# Altium schematic symbol library 可调稳压模块.SchLib: 5 symbols
Pins are listed as number, name and electrical type; pins without a type are passive.

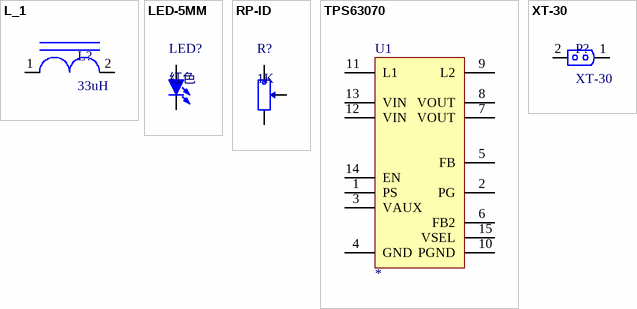
[diagram p0: symbols L_1 to XT-30]

## L_1
designator L?, comment 33uH
一体化成型电感
footprint IND-SMD_L7.0-W6.6_FXL0630
pins: 1, 2

## LED-5MM
designator LED?, comment 红色
0805LED; BOM名称: 5mm插件LED; 版权归属: 源创客; 学习资源: www.ooocke.com
footprint LED 0805B (蓝色0805LED)
pins: 1 A, 2 K

## RP-ID
designator R?, comment 1K
插件单联电位器; BOM名称: 插件电位器; 版权归属: 源创客; 学习资源: www.ooocke.com
footprint 3296W (Precise Multi-Winding Adjustable Resistor)
pins: 1, 2, 3

## TPS63070
designator U1
TPS63070
footprint LQ_VQFN15
pins: 1 PS, 2 PG, 3 VAUX, 4 GND, 5 FB, 6 FB2, 7 VOUT, 8 VOUT, 9 L2, 10 PGND, 11 L1, 12 VIN, 13 VIN, 14 EN, 15 VSEL
2 alternate drawings of the same symbol

## XT-30
designator P?
接口
footprint xt-30 (长：16mm，宽：8.2mm，高：16mm)
pins: 1, 2